# EAGLE library part HMC784AMS8GE (library HMC784AMS8GE)
RF Switch SPDT 0MHz to 4GHz 24dB Automotive 8-Pin MSOP EP T/R Source: Datasheet <https://www.analog.com/media/en/technical-documentation/data-sheets/hmc784a.pdf>
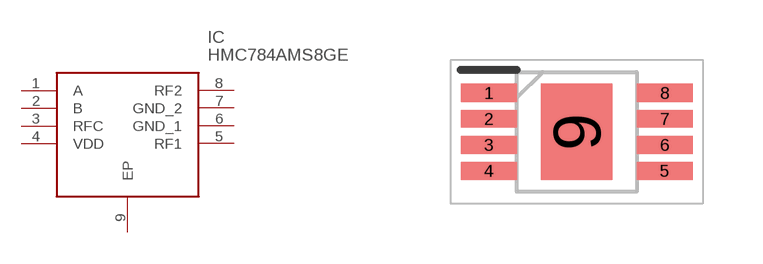
[diagram p0: symbol with the pads of SOP65P488X110-9N; footprint SOP65P488X110-9N]

Designator prefix IC

## HMC784AMS8GE (Description: RF Switch SPDT 0MHz to 4GHz 24dB Automotive 8-Pin MSOP EP T/R; Height: 1.1mm; Manufacturer_Name: Analog Devices; Manufacturer_Part_Number: HMC784AMS8GE; Mouser_Part_Number: 584-HMC784AMS8GE; Mouser_Price-Stock: https://www.mouser.co.uk/ProductDetail/Analog-Devices/HMC784AMS8GE?qs=AZz8fAaf6P%2Fj9bffWbFAng%3D%3D)  [SOP65P488X110-9N]
1  A
2  B
3  RFC
4  VDD
5  RF1
6  GND_1
7  GND_2
8  RF2
9  EP

## Footprint SOP65P488X110-9N (pad centres in mm)
HMC784AMS8GE
smd 1.4 x 0.45: 1 -2.2,0.975; 2 -2.2,0.325; 3 -2.2,-0.325; 4 -2.2,-0.975; 5 2.2,-0.975; 6 2.2,-0.325; 7 2.2,0.325; 8 2.2,0.975
smd 1.78 x 2.41: 9 0,0